# Altium footprint library Chris_R.PcbLib: 69 footprints (part 3 of 5)
Each footprint in its own frame and in the unit in brackets; x right, y up, seen from the top. Pads: shape width x height; smd on the part's side, far side on the other; paste and mask are expansions set on the pad; w line width, h text height; cw(c..) or ccw(c..) is an arc to the next point about the centre after c.
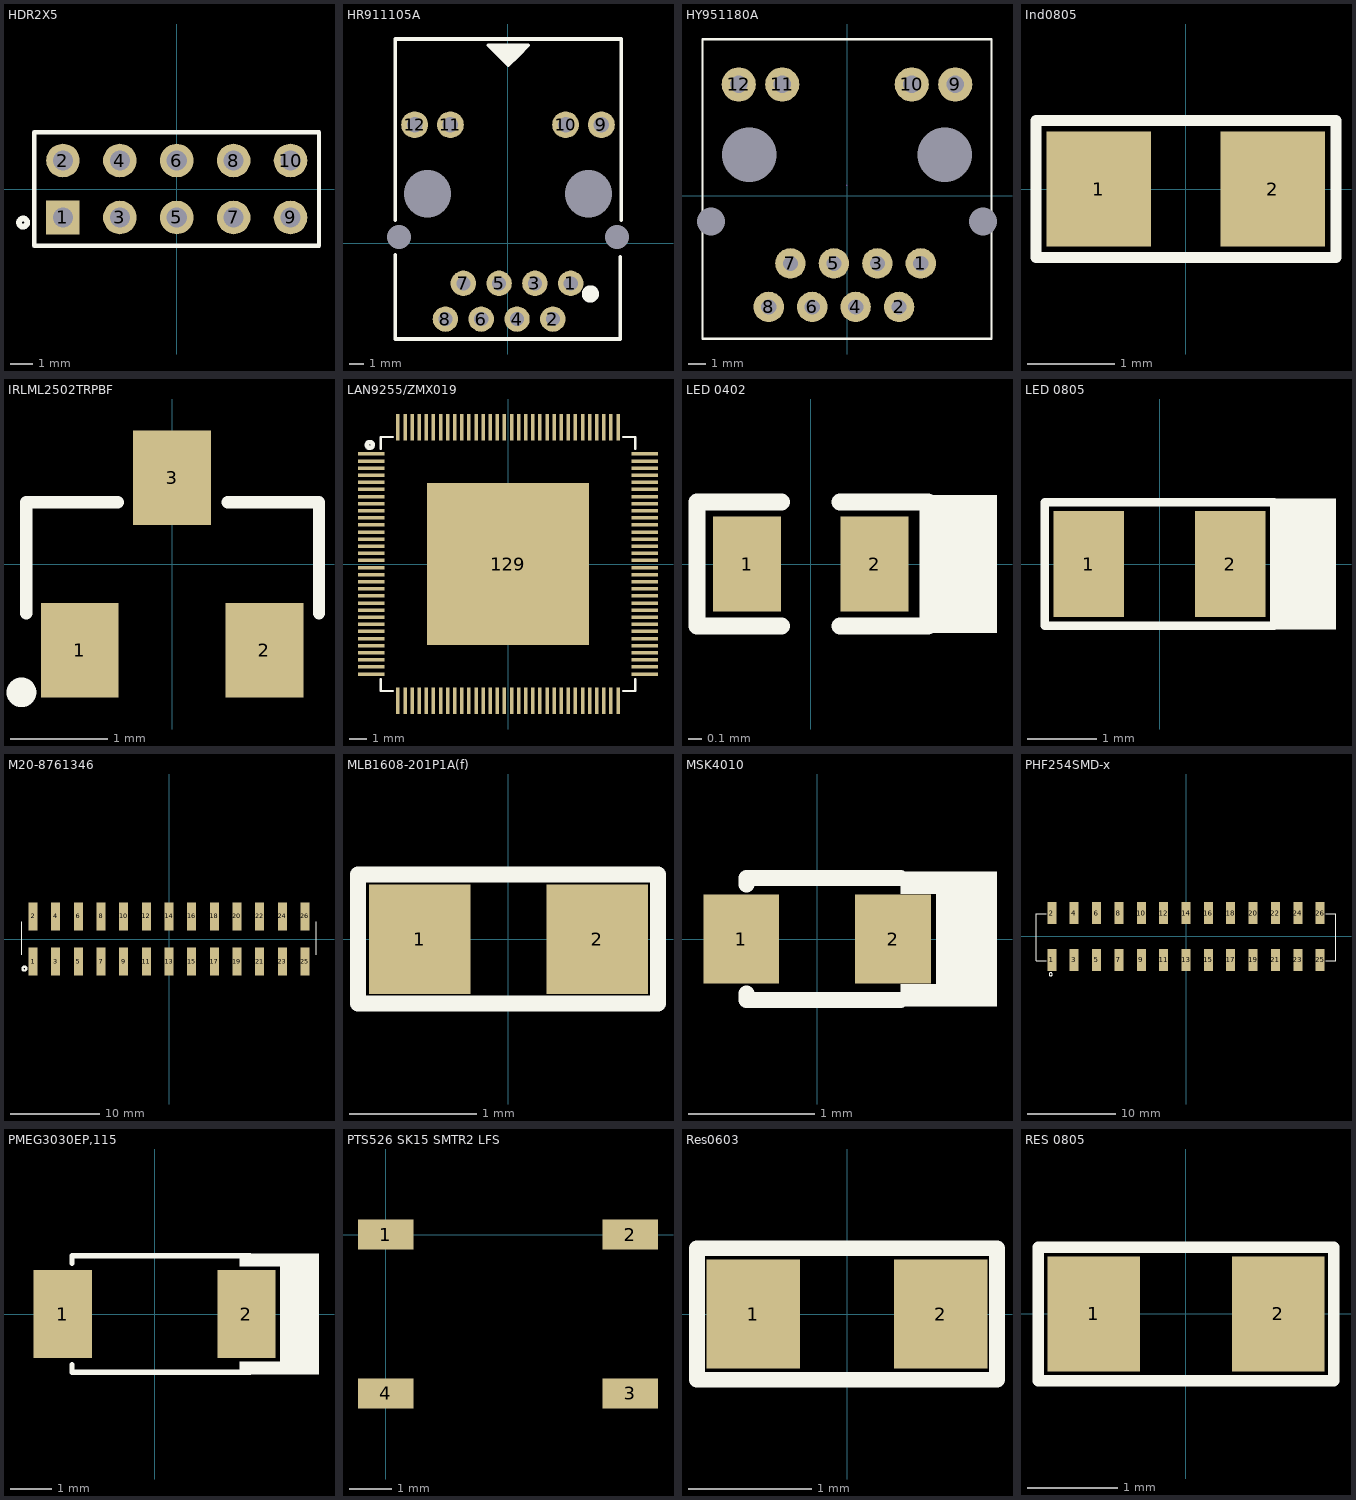
[diagram p2: the footprints below, top view; thin cyan lines are the x and y axes]

## HDR2X5 [mm] "Connector; Header; 5x2 Position"
pads (10):
  rect 1.5x1.5 hole 0.9: 1(-5.08,-1.27)
  round 1.5 hole 0.9: 2(-5.08,1.27) 3(-2.54,-1.27) 4(-2.54,1.27) 5(0,-1.27) 6(0,1.27) 7(2.54,-1.27) 8(2.54,1.27) 9(5.08,-1.27) 10(5.08,1.27)
Top Overlay:
  circle w0.254: c-6.858,-1.499 r0.183
  lines w0.2: -6.35,-2.54 6.35,-2.54 6.35,2.54 -6.35,2.54 -6.35,-2.54
3D body "70288219.stp": height 8.8, standoff -3, extent -6.35,-2.5 6.35,2.5

## HR911105A [mm]
pads (16):
  round 1.8 hole 1: 1(4.45,-2.83) 2(3.18,-5.37) 3(1.91,-2.83) 4(0.64,-5.37) 5(-0.63,-2.83) 6(-1.9,-5.37) 7(-3.17,-2.83) 8(-4.44,-5.37)
  round 1.9 hole 1.1: 9(6.625,8.42) 10(4.085,8.42) 11(-4.085,8.42) 12(-6.625,8.42)
  round 0 hole 1.7 unplated: MH1(-7.745,0.47) MH4(7.745,0.47)
  round 0 hole 3.35 unplated: MH2(-5.715,3.52) MH3(5.715,3.52)
Top Overlay:
  circle w1: c5.842,-3.581 r0.105
  region: 0.711,14.046 -0.66,14.046 -0.66,13.335 0.711,13.335
  region: 0.584,13.818 -0.076,13.818 -0.076,13.106 0.584,13.106
  region: 0.051,13.818 -0.61,13.818 -0.61,13.106 0.051,13.106
  region: 0.305,13.487 -0.279,13.487 -0.279,12.776 0.305,12.776
  region: 1.168,14.021 0.711,14.021 0.711,13.614 1.168,13.614
  region: -0.66,14.021 -1.118,14.021 -1.118,13.614 -0.66,13.614
  region: 0.483,13.36 0.025,13.36 0.025,12.954 0.483,12.954
  lines w0.254: -8.001,-0.813 -8.001,-6.782 7.976,-6.782 7.976,-0.94 ; -8.001,1.651 -8.001,14.503 8.026,14.503 8.026,1.651 ; -0.673,14.059 -1.384,14.059 -0.66,13.335 ; 0.724,14.059 1.435,14.059 0.711,13.335 ; -0.66,13.335 0.025,12.649 0.711,13.335 ; -0.66,13.335 -0.66,14.046 0.711,14.046 0.711,13.335
3D body "hr911105a1.stp": height 13.75, standoff -3.05, extent -7.9,-6.709 7.9,14.431

## HY951180A [mm]
pads (16):
  round 1.78 hole 0.89: 1(4.315,-3.96) 2(3.045,-6.5) 3(1.775,-3.96) 4(0.505,-6.5) 5(-0.765,-3.96) 6(-2.035,-6.5) 7(-3.305,-3.96) 8(-4.575,-6.5)
  round 2 hole 1.02: 9(6.325,6.5) 10(3.785,6.5) 11(-3.785,6.5) 12(-6.325,6.5)
  round 0 hole 3.2 unplated: MH1(-5.715,2.39) MH2(5.715,2.39)
  round 0 hole 1.63: MH3(7.95,-1.51) MH4(-7.95,-1.51)
Top Overlay:
  lines w0.127: -8.45,-8.36 -8.45,9.14 8.45,9.14 8.45,-8.36 -8.45,-8.36
Mechanical 15:
  lines w0.003: -0.025,0.598 0.025,0.649
3D body "HY951180A.stp": height 17.6, standoff -5, extent -8.687,-8.356 8.638,9.144

## Ind0805 [mm] "Inductor 0805"
pads (2):
  rect 1.2x1.32 smd: 1(-1,0) 2(1,0)
Top Overlay:
  lines w0.127: -1.723,-0.787 -1.723,0.787 1.727,0.787 1.727,-0.787 -1.723,-0.787
3D body "45637.stp": height 0.47, standoff -0.03, extent -1,-0.625 1,0.625

## IRLML2502TRPBF [mm] "MOSFET N-CH 20V 4.2A SOT23"
pads (3):
  rect 0.802x0.972 smd: 1(-0.95,-0.885) 2(0.95,-0.885) 3(0,0.885)
Top Overlay:
  circle w0.254: c-1.549,-1.321 r0.025
  lines w0.127: -1.499,-0.508 -1.499,0.635 -0.559,0.635 ; 0.572,0.635 1.511,0.635 1.511,-0.508
3D body "PG-TO23-3_INF.step": height 1.12, standoff 0, extent -1.524,-1.321 1.524,1.321

## LAN9255/ZMX019 [mm]
pads (129):
  rect 1.5x0.2 smd: 1(-7.7,6.2) 2(-7.7,5.8) 3(-7.7,5.4) 4(-7.7,5) 5(-7.7,4.6) 6(-7.7,4.2) 7(-7.7,3.8) 8(-7.7,3.4) 9(-7.7,3) 10(-7.7,2.6) 11(-7.7,2.2) 12(-7.7,1.8) 13(-7.7,1.4) 14(-7.7,1) 15(-7.7,0.6) 16(-7.7,0.2) 17(-7.7,-0.2) 18(-7.7,-0.6) 19(-7.7,-1) 20(-7.7,-1.4) 21(-7.7,-1.8) 22(-7.7,-2.2) 23(-7.7,-2.6) 24(-7.7,-3) 25(-7.7,-3.4) 26(-7.7,-3.8) 27(-7.7,-4.2) 28(-7.7,-4.6) 29(-7.7,-5) 30(-7.7,-5.4) 31(-7.7,-5.8) 32(-7.7,-6.2) 65(7.7,-6.2) 66(7.7,-5.8) 67(7.7,-5.4) 68(7.7,-5) 69(7.7,-4.6) 70(7.7,-4.2) 71(7.7,-3.8) 72(7.7,-3.4) 73(7.7,-3) 74(7.7,-2.6) 75(7.7,-2.2) 76(7.7,-1.8) 77(7.7,-1.4) 78(7.7,-1) 79(7.7,-0.6) 80(7.7,-0.2) 81(7.7,0.2) 82(7.7,0.6) 83(7.7,1) 84(7.7,1.4) 85(7.7,1.8) 86(7.7,2.2) 87(7.7,2.6) 88(7.7,3) 89(7.7,3.4) 90(7.7,3.8) 91(7.7,4.2) 92(7.7,4.6) 93(7.7,5) 94(7.7,5.4) 95(7.7,5.8) 96(7.7,6.2)
  rect 0.2x1.5 smd: 33(-6.2,-7.7) 34(-5.8,-7.7) 35(-5.4,-7.7) 36(-5,-7.7) 37(-4.6,-7.7) 38(-4.2,-7.7) 39(-3.8,-7.7) 40(-3.4,-7.7) 41(-3,-7.7) 42(-2.6,-7.7) 43(-2.2,-7.7) 44(-1.8,-7.7) 45(-1.4,-7.7) 46(-1,-7.7) 47(-0.6,-7.7) 48(-0.2,-7.7) 49(0.2,-7.7) 50(0.6,-7.7) 51(1,-7.7) 52(1.4,-7.7) 53(1.8,-7.7) 54(2.2,-7.7) 55(2.6,-7.7) 56(3,-7.7) 57(3.4,-7.7) 58(3.8,-7.7) 59(4.2,-7.7) 60(4.6,-7.7) 61(5,-7.7) 62(5.4,-7.7) 63(5.8,-7.7) 64(6.2,-7.7) 97(6.2,7.7) 98(5.8,7.7) 99(5.4,7.7) 100(5,7.7) 101(4.6,7.7) 102(4.2,7.7) 103(3.8,7.7) 104(3.4,7.7) 105(3,7.7) 106(2.6,7.7) 107(2.2,7.7) 108(1.8,7.7) 109(1.4,7.7) 110(1,7.7) 111(0.6,7.7) 112(0.2,7.7) 113(-0.2,7.7) 114(-0.6,7.7) 115(-1,7.7) 116(-1.4,7.7) 117(-1.8,7.7) 118(-2.2,7.7) 119(-2.6,7.7) 120(-3,7.7) 121(-3.4,7.7) 122(-3.8,7.7) 123(-4.2,7.7) 124(-4.6,7.7) 125(-5,7.7) 126(-5.4,7.7) 127(-5.8,7.7) 128(-6.2,7.7)
  rect 9.1x9.1 smd: 129(0,0)
Top Overlay:
  circle w0.254: c-7.785,6.706 r0.165
  lines w0.127: -7.163,-6.49 -7.163,-7.15 -6.477,-7.15 ; -7.163,6.49 -7.163,7.15 -6.477,7.15 ; 6.477,-7.15 7.163,-7.15 7.163,-6.49 ; 6.477,7.15 7.163,7.15 7.163,6.49
3D body "User Library-TQFP128.step": height 1.1, standoff 0, extent -8.009,-8.009 8.009,8.009

## LED 0402 [mm] "Green 520~535nm 0402 Light Emitting Diodes (LED) RoHS"
pads (2):
  rect 0.5x0.7 smd: 1(-0.47,0) 2(0.47,0)
Top Overlay:
  rectangle: 0.864,-0.508 1.372,0.508
  lines w0.127: -0.216,-0.457 -0.838,-0.457 -0.838,0.457 -0.216,0.457 ; 0.216,-0.457 0.864,-0.457 0.864,0.457 0.216,0.457
3D body "APHHS1005.STEP": height 0.5, standoff 0, extent -0.5,-0.25 0.5,0.25

## LED 0805 [mil] "SMD 0805"
pads (2):
  rect 40x60 smd: 1(-40,0) 2(40,0)
Top Overlay:
  region: 100,37 64,37 64,-37 100,-37
  lines w5: -65,-35 65,-35 65,35 -65,35 -65,-35
3D body "User Library-User Library-led_0805 GRE.step": height 43.31, standoff 0, extent -39.77,-24.61 39.76,24.6

## M20-8761346 [mm]
pads (26):
  rect 1x3.15 smd: 1(-15.24,-2.525) 2(-15.24,2.525) 3(-12.7,-2.525) 4(-12.7,2.525) 5(-10.16,-2.525) 6(-10.16,2.525) 7(-7.62,-2.525) 8(-7.62,2.525) 9(-5.08,-2.525) 10(-5.08,2.525) 11(-2.54,-2.525) 12(-2.54,2.525) 13(0,-2.525) 14(0,2.525) 15(2.54,-2.525) 16(2.54,2.525) 17(5.08,-2.525) 18(5.08,2.525) 19(7.62,-2.525) 20(7.62,2.525) 21(10.16,-2.525) 22(10.16,2.525) 23(12.7,-2.525) 24(12.7,2.525) 25(15.24,-2.525) 26(15.24,2.525)
Top Overlay:
  circle w0.254: c-16.205,-3.315 r0.222
  lines w0.127: -16.523,-1.791 -16.523,1.93 ; 16.523,-1.791 16.523,1.93
3D body "m20-8761346_asm.stp": height 9.9, standoff -0.03, extent -16.459,-3.657 16.561,3.543

## MLB1608-201P1A(f) [mm] "200O @ 100MHz 1 1A 300mO 0603 Ferrite Beads"
pads (2):
  rect 0.8x0.864 smd: 1(-0.7,0) 2(0.7,0)
Top Overlay:
  lines w0.127: -1.186,-0.507 1.181,-0.507 1.181,0.509 -1.186,0.509 -1.186,-0.507
3D body "742792602.stp": height 0.79, standoff -0.01, extent -0.8,-0.4 0.8,0.4

## MSK4010 [mm] "SOD-523 Schottky Barrier Diodes (SBD) ROHS"
pads (2):
  rect 0.6x0.7 smd: 1(-0.6,0) 2(0.6,0)
Top Overlay:
  rectangle: 0.66,0.356 1.422,0.533
  rectangle: 0.66,-0.533 1.422,-0.356
  rectangle: 0.94,-0.381 1.422,0.381
  lines w0.127: -0.559,-0.483 0.66,-0.483 ; -0.559,-0.482 -0.559,-0.432 ; -0.559,0.432 -0.559,0.482 ; -0.559,0.483 0.66,0.483
3D body "User Library-SOD-523F.step": height 0.7, standoff 0, extent -0.8,-0.399 0.8,0.399

## PHF254SMD-x [mm]
pads (26):
  rect 1.02x2.5 smd: 1(-15.24,-2.65) 2(-15.24,2.65) 3(-12.7,-2.65) 4(-12.7,2.65) 5(-10.16,-2.65) 6(-10.16,2.65) 7(-7.62,-2.65) 8(-7.62,2.65) 9(-5.08,-2.65) 10(-5.08,2.65) 11(-2.54,-2.65) 12(-2.54,2.65) 13(0,-2.65) 14(0,2.65) 15(2.54,-2.65) 16(2.54,2.65) 17(5.08,-2.65) 18(5.08,2.65) 19(7.62,-2.65) 20(7.62,2.65) 21(10.16,-2.65) 22(10.16,2.65) 23(12.7,-2.65) 24(12.7,2.65) 25(15.24,-2.65) 26(15.24,2.65)
Top Overlay:
  circle w0.127: c-15.367,-4.301 r0.18
  lines w0.127: -15.875,-2.747 -17.043,-2.747 -17.043,2.553 -15.875,2.553 ; 15.875,-2.747 17.043,-2.747 17.043,2.553 15.875,2.553
3D body "phf254smd-x_Updated.stp": height 8.5, standoff 0, extent -17.01,-3.5 17.01,3.5

## PMEG3030EP,115 [mm] "DIODE SCHOTTKY 30V 3A CFP5"
pads (2):
  rect 1.4x2.1 smd: 1(-2.2,0) 2(2.2,0)
Top Overlay:
  rectangle: 2.032,1.143 3.937,1.448
  rectangle: 2.032,-1.448 3.937,-1.143
  rectangle: 2.997,-1.143 3.937,1.143
  lines w0.127: -1.981,-1.219 -1.981,-1.397 2.286,-1.397 ; -1.981,1.219 -1.981,1.397 2.286,1.397
3D body "User Library-SOD128.step": height 1.1, standoff -0.01, extent -2.5,-1.35 2.5,1.35

## PTS526 SK15 SMTR2 LFS [mm]
pads (4):
  rect 1.3x0.7 smd: 1(0,0) 2(5.7,0) 3(5.7,-3.7) 4(0,-3.7)

## Res0603 [mil]
pads (2):
  rect 30x35 smd: 1(-30,0) 2(30,0)
Top Overlay:
  lines w5: -48,-21 48,-21 48,21 -48,21 -48,-21
3D body "User Library-RESC1608X05N.step": height 17.76, standoff 0, extent -30.52,-16.74 30.51,16.73

## RES 0805 [mil] "SMD 0805"
pads (2):
  rect 40x50 smd: 1(-40,0) 2(40,0)
Top Overlay:
  lines w5: -64,-29 -64,29 64,29 64,-29 -64,-29
3D body "User Library-CR2012-0805.STEP": height 23.62, standoff 0, extent -39.34,-24.75 39.4,24.46